# Altium footprint library Peinetas.PcbLib: 36 footprints (part 1 of 3)
Each footprint in its own frame and in the unit in brackets; x right, y up, seen from the top. Pads: shape width x height; smd on the part's side, far side on the other; paste and mask are expansions set on the pad; w line width, h text height; cw(c..) or ccw(c..) is an arc to the next point about the centre after c.
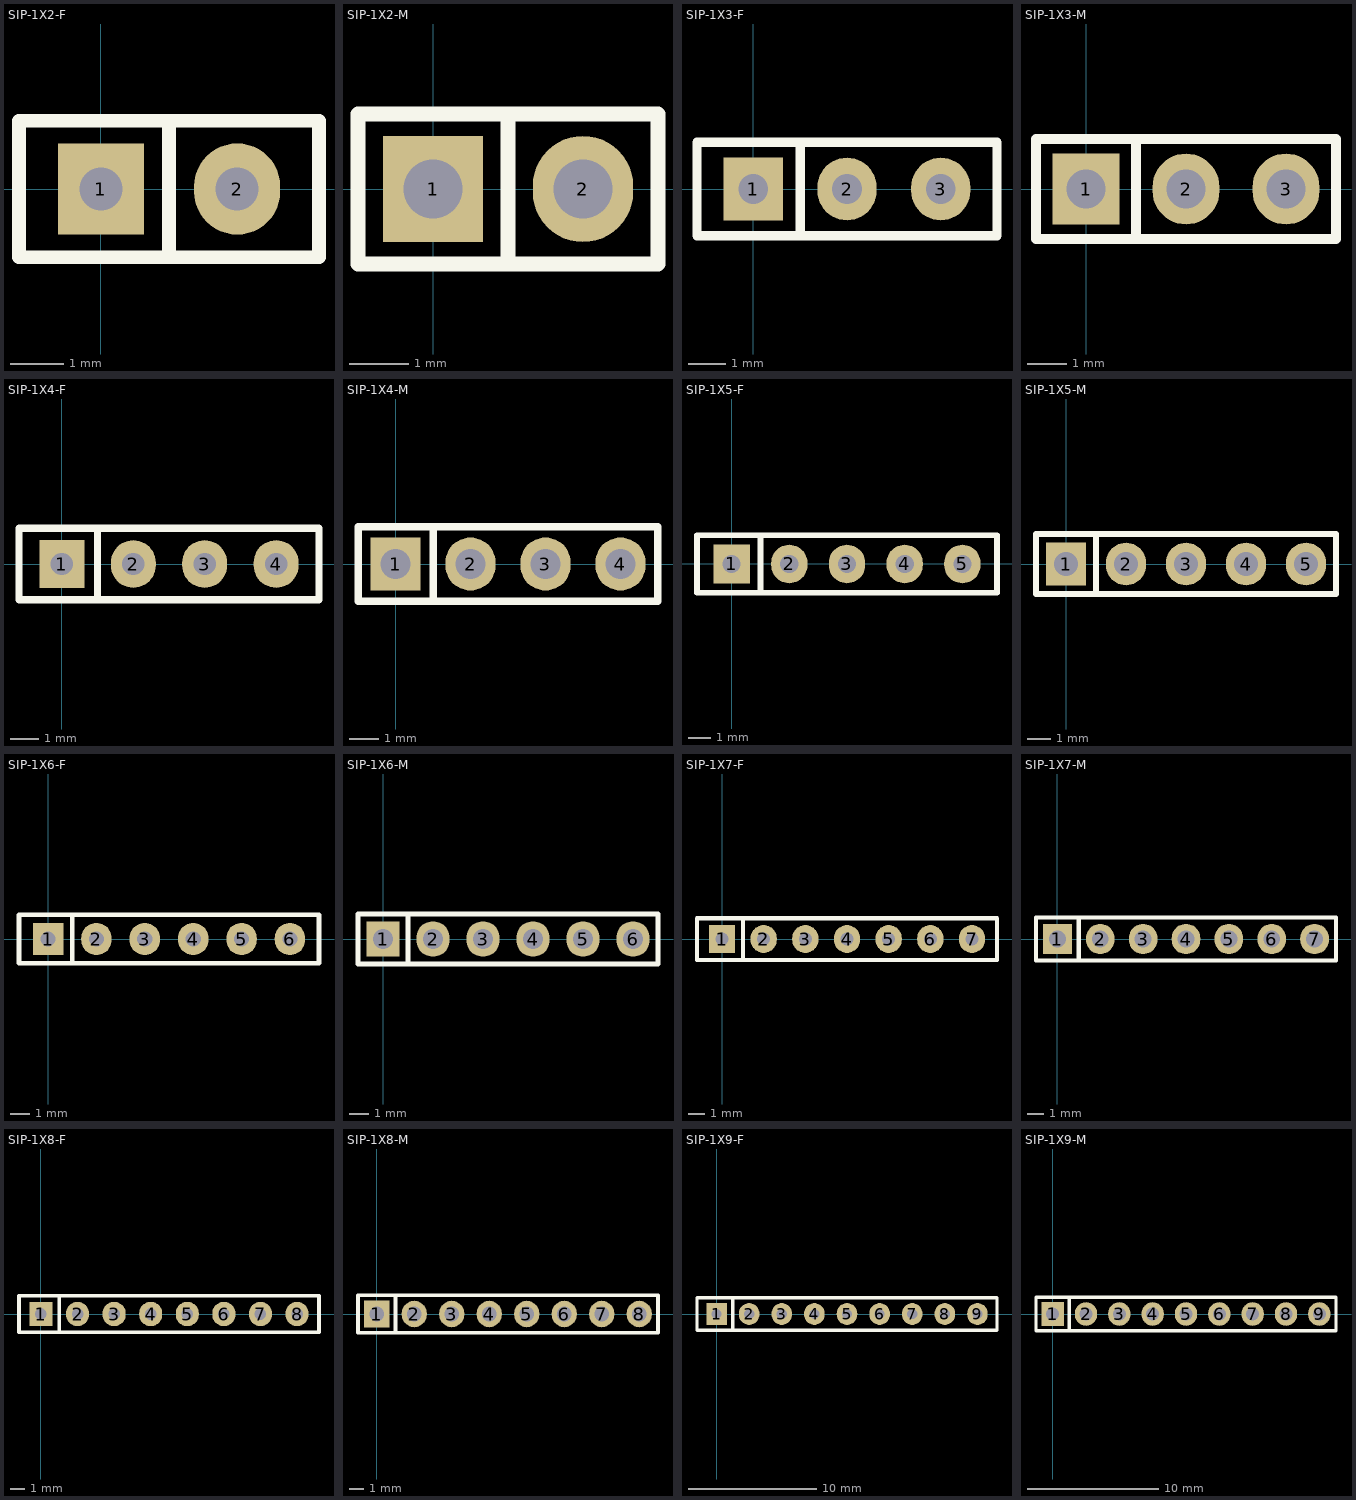
[diagram p0: the footprints below, top view; thin cyan lines are the x and y axes]

## SIP-1X2-F [mm]
pads (2):
  rect 1.6x1.7 hole 0.8: 1(0,0)
  oval 1.6x1.7 hole 0.8: 2(2.54,0)
Top Overlay:
  lines w0.254: 1.27,-1.27 1.27,1.27 ; -1.524,-1.27 -1.524,1.27 4.064,1.27 4.064,-1.27 -1.524,-1.27
3D body "hdrf-1x2t_2.54_6x3.step": height 8.5, standoff -3.2, extent -1.52,-1.25 4.06,1.25

## SIP-1X2-M [mm]
pads (2):
  rect 1.7x1.8 hole 1: 1(0,0)
  oval 1.7x1.8 hole 1: 2(2.54,0)
Top Overlay:
  lines w0.254: 1.27,-1.27 1.27,1.27 ; -1.27,-1.27 -1.27,1.27 3.81,1.27 3.81,-1.27 -1.27,-1.27
3D body "hdr-1x2t_2.54_5x2.step": height 10.04, standoff -2.8, extent -1.12,-1.16 3.66,1.16

## SIP-1X3-F [mm]
pads (3):
  rect 1.6x1.7 hole 0.8: 1(0,0)
  oval 1.6x1.7 hole 0.8: 2(2.54,0) 3(5.08,0)
Top Overlay:
  lines w0.254: 1.27,-1.27 1.27,1.27 ; -1.524,-1.27 -1.524,1.27 6.604,1.27 6.604,-1.27 -1.524,-1.27
3D body "hdrf-1x3t_2.54_8x3.step": height 8.5, standoff -3.2, extent -1.52,-1.25 6.6,1.25

## SIP-1X3-M [mm]
pads (3):
  rect 1.7x1.8 hole 1: 1(0,0)
  oval 1.7x1.8 hole 1: 2(2.54,0) 3(5.08,0)
Top Overlay:
  lines w0.254: 1.27,-1.27 1.27,1.27 ; -1.27,-1.27 -1.27,1.27 6.35,1.27 6.35,-1.27 -1.27,-1.27
3D body "hdr-1x3t_2.54_7x2.step": height 10.04, standoff -2.8, extent -1.12,-1.16 6.2,1.16

## SIP-1X4-F [mm]
pads (4):
  rect 1.6x1.7 hole 0.8: 1(0,0)
  oval 1.6x1.7 hole 0.8: 2(2.54,0) 3(5.08,0) 4(7.62,0)
Top Overlay:
  lines w0.254: 1.27,-1.27 1.27,1.27 ; -1.524,-1.27 9.144,-1.27 9.144,1.27 -1.524,1.27 -1.524,-1.27
3D body "hdrf-1x4t_2.54_11x3.step": height 8.5, standoff -3.2, extent -1.52,-1.25 9.14,1.25

## SIP-1X4-M [mm]
pads (4):
  rect 1.7x1.8 hole 1: 1(0,0)
  oval 1.7x1.8 hole 1: 2(2.54,0) 3(5.08,0) 4(7.62,0)
Top Overlay:
  lines w0.254: 1.27,-1.27 1.27,1.27 ; -1.27,-1.27 -1.27,1.27 8.89,1.27 8.89,-1.27 -1.27,-1.27
3D body "hdr-1x4t_2.54_10x2.step": height 10.04, standoff -2.8, extent -1.175,-1.11 8.685,1.21

## SIP-1X5-F [mm]
pads (5):
  rect 1.6x1.7 hole 0.8: 1(0,0)
  oval 1.6x1.7 hole 0.8: 2(2.54,0) 3(5.08,0) 4(7.62,0) 5(10.16,0)
Top Overlay:
  lines w0.254: 1.27,-1.27 1.27,1.27 ; -1.524,-1.27 11.684,-1.27 11.684,1.27 -1.524,1.27 -1.524,-1.27
3D body "hdrf-1x5t_2.54_13x3.step": height 8.5, standoff -3.2, extent -1.52,-1.25 11.68,1.25

## SIP-1X5-M [mm]
pads (5):
  rect 1.7x1.8 hole 1: 1(0,0)
  oval 1.7x1.8 hole 1: 2(2.54,0) 3(5.08,0) 4(7.62,0) 5(10.16,0)
Top Overlay:
  lines w0.254: 1.27,-1.27 1.27,1.27 ; -1.27,-1.27 -1.27,1.27 11.43,1.27 11.43,-1.27 -1.27,-1.27
3D body "hdr-1x5t_2.54_12x2.step": height 10.04, standoff -2.8, extent -1.12,-1.16 11.28,1.16

## SIP-1X6-F [mm]
pads (6):
  rect 1.6x1.7 hole 0.8: 1(0,0)
  oval 1.6x1.7 hole 0.8: 2(2.54,0) 3(5.08,0) 4(7.62,0) 5(10.16,0) 6(12.7,0)
Top Overlay:
  lines w0.254: 1.27,-1.27 1.27,1.27 ; -1.524,-1.27 -1.524,1.27 14.224,1.27 14.224,-1.27 -1.524,-1.27
3D body "hdrf-1x6t_2.54_16x3.step": height 8.5, standoff -3.2, extent -1.52,-1.25 14.22,1.25

## SIP-1X6-M [mm]
pads (6):
  rect 1.7x1.8 hole 1: 1(0,0)
  oval 1.7x1.8 hole 1: 2(2.54,0) 3(5.08,0) 4(7.62,0) 5(10.16,0) 6(12.7,0)
Top Overlay:
  lines w0.254: 1.27,-1.27 1.27,1.27 ; -1.27,-1.27 13.97,-1.27 13.97,1.27 -1.27,1.27 -1.27,-1.27
3D body "hdr-1x6t_2.54_15x2.step": height 10.04, standoff -2.8, extent -1.12,-1.16 13.82,1.16

## SIP-1X7-F [mm]
pads (7):
  rect 1.6x1.7 hole 0.8: 1(0,0)
  oval 1.6x1.7 hole 0.8: 2(2.54,0) 3(5.08,0) 4(7.62,0) 5(10.16,0) 6(12.7,0) 7(15.24,0)
Top Overlay:
  lines w0.254: 1.27,-1.27 1.27,1.27 ; -1.524,-1.27 -1.524,1.27 16.764,1.27 16.764,-1.27 -1.524,-1.27
3D body "hdrf-1x7t_2.54_18x3.step": height 8.5, standoff -3.2, extent -1.52,-1.25 16.76,1.25

## SIP-1X7-M [mm]
pads (7):
  rect 1.7x1.8 hole 1: 1(0,0)
  oval 1.7x1.8 hole 1: 2(2.54,0) 3(5.08,0) 4(7.62,0) 5(10.16,0) 6(12.7,0) 7(15.24,0)
Top Overlay:
  lines w0.254: 1.27,-1.27 1.27,1.27 ; -1.27,-1.27 16.51,-1.27 16.51,1.27 -1.27,1.27 -1.27,-1.27
3D body "hdr-1x7t_2.54_18x2.step": height 10.04, standoff -2.8, extent -1.12,-1.16 16.36,1.16

## SIP-1X8-F [mm]
pads (8):
  rect 1.6x1.7 hole 0.8: 1(0,0)
  oval 1.6x1.7 hole 0.8: 2(2.54,0) 3(5.08,0) 4(7.62,0) 5(10.16,0) 6(12.7,0) 7(15.24,0) 8(17.78,0)
Top Overlay:
  lines w0.254: 1.27,-1.27 1.27,1.27 ; -1.524,-1.27 -1.524,1.27 19.304,1.27 19.304,-1.27 -1.524,-1.27
3D body "hdrf-1x8t_2.54_21x3.step": height 8.5, standoff -3.2, extent -1.52,-1.25 19.3,1.25

## SIP-1X8-M [mm]
pads (8):
  rect 1.7x1.8 hole 1: 1(0,0)
  oval 1.7x1.8 hole 1: 2(2.54,0) 3(5.08,0) 4(7.62,0) 5(10.16,0) 6(12.7,0) 7(15.24,0) 8(17.78,0)
Top Overlay:
  lines w0.254: 1.27,-1.27 1.27,1.27 ; -1.27,-1.27 -1.27,1.27 19.05,1.27 19.05,-1.27 -1.27,-1.27
3D body "hdr-1x8t_2.54_20x2.step": height 10.04, standoff -2.8, extent -1.097,-1.16 18.923,1.16

## SIP-1X9-F [mm]
pads (9):
  rect 1.6x1.7 hole 0.8: 1(0,0)
  oval 1.6x1.7 hole 0.8: 2(2.54,0) 3(5.08,0) 4(7.62,0) 5(10.16,0) 6(12.7,0) 7(15.24,0) 8(17.78,0) 9(20.32,0)
Top Overlay:
  lines w0.254: 1.27,-1.27 1.27,1.27 ; -1.524,-1.27 -1.524,1.27 21.844,1.27 21.844,-1.27 -1.524,-1.27
3D body "hdrf-1x9t_2.54_23x3.step": height 8.5, standoff -3.2, extent -1.52,-1.25 21.84,1.25

## SIP-1X9-M [mm]
pads (9):
  rect 1.7x1.8 hole 1: 1(0,0)
  oval 1.7x1.8 hole 1: 2(2.54,0) 3(5.08,0) 4(7.62,0) 5(10.16,0) 6(12.7,0) 7(15.24,0) 8(17.78,0) 9(20.32,0)
Top Overlay:
  lines w0.254: 1.27,-1.27 1.27,1.27 ; -1.27,-1.27 21.59,-1.27 21.59,1.27 -1.27,1.27 -1.27,-1.27
3D body "hdr-1x9t_2.54_23x2.step": height 10.04, standoff -2.8, extent -1.12,-1.16 21.44,1.16